# Altium footprint library USB_Hub.PcbLib: 9 footprints
Each footprint in its own frame and in the unit in brackets; x right, y up, seen from the top. Pads: shape width x height; smd on the part's side, far side on the other; paste and mask are expansions set on the pad; w line width, h text height; cw(c..) or ccw(c..) is an arc to the next point about the centre after c.
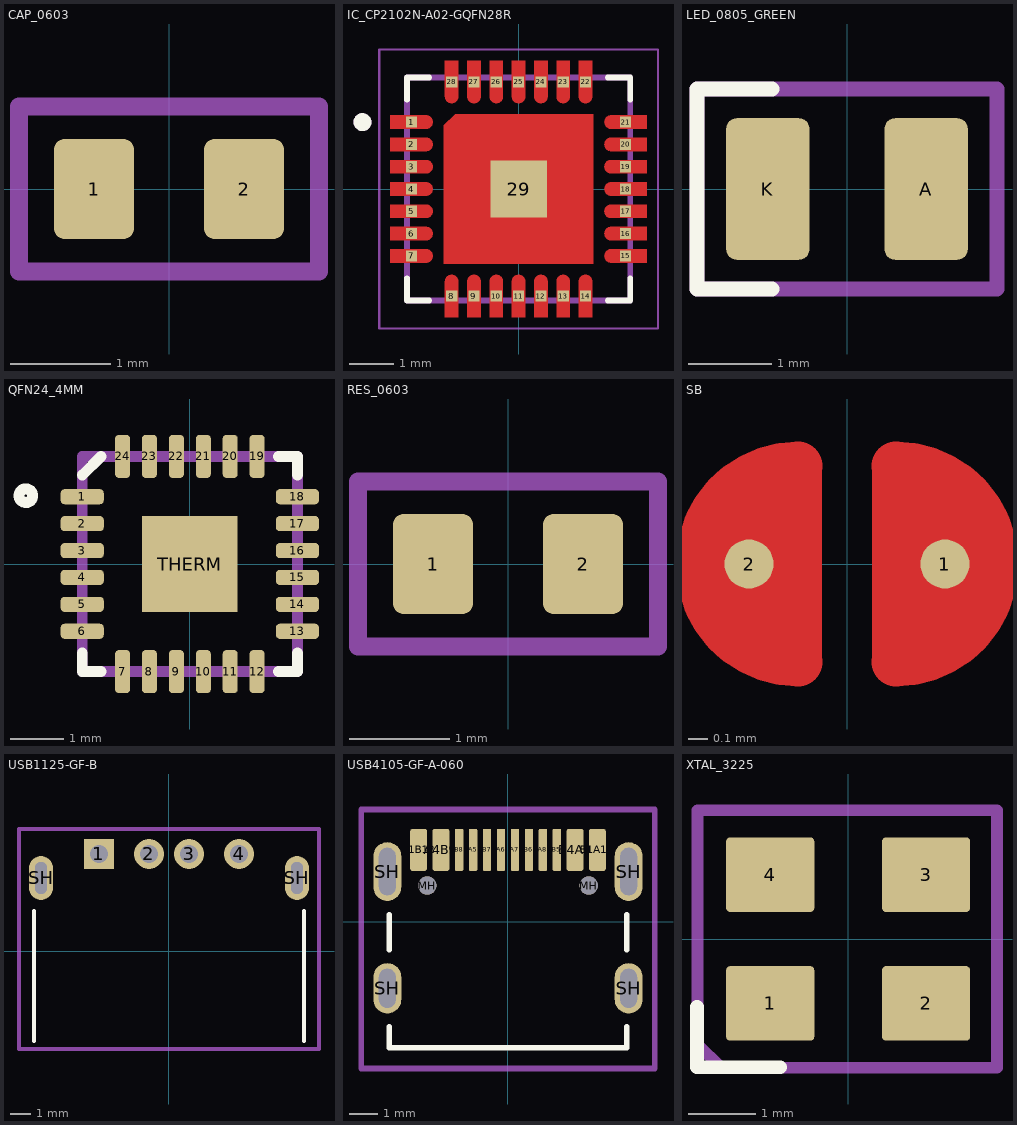
[diagram p0: the footprints below, top view; thin cyan lines are the x and y axes]

## CAP_0603 [mm]
pads (2):
  rrect25% 0.8x1 smd: 1(-0.75,0) 2(0.75,0)
Mechanical 13:
  lines w0.175: -1.5,-0.825 -1.5,0.825 1.5,0.825 1.5,-0.825 -1.5,-0.825
  text "'.Designator'" at -5.665,-0.417 h1
3D body "C0603C104K5RACTU.STEP": height 0.8, standoff 0, extent -0.8,-0.475 0.8,0.475

## IC_CP2102N-A02-GQFN28R [mm]
height 0.8
pads (29):
  rect 0.25x0.25 smd paste-1 mask+0: 1(-2.4,1.5) 2(-2.4,1) 3(-2.4,0.5) 4(-2.4,0) 5(-2.4,-0.5) 6(-2.4,-1) 7(-2.4,-1.5) 8(-1.5,-2.4) 9(-1,-2.4) 10(-0.5,-2.4) 11(0,-2.4) 12(0.5,-2.4) 13(1,-2.4) 14(1.5,-2.4) 15(2.4,-1.5) 16(2.4,-1) 17(2.4,-0.5) 18(2.4,0) 19(2.4,0.5) 20(2.4,1) 21(2.4,1.5) 22(1.5,2.4) 23(1,2.4) 24(0.5,2.4) 25(0,2.4) 26(-0.5,2.4) 27(-1,2.4) 28(-1.5,2.4)
  rect 1.27x1.27 smd paste+0.424 mask+0: 29(0,0)
Top Layer:
  drawing of 29 lines, arcs and shapes, not listed
Top Overlay:
  circle w0.2: c-3.5,1.5 r0.1
  lines w0.127: -2.5,-2 -2.5,-2.5 -2,-2.5 ; -2.5,2 -2.5,2.5 -2,2.5 ; 2,-2.5 2.5,-2.5 2.5,-2 ; 2,2.5 2.5,2.5 2.5,2
Top Paste:
  drawing of 28 lines, arcs and shapes, not listed
Top Solder:
  drawing of 29 lines, arcs and shapes, not listed
Mechanical 13:
  circle w0.2: c-3.5,1.5 r0.1
  lines w0.127: -2.5,-2.5 2.5,-2.5 2.5,2.5 -2.5,2.5 -2.5,-2.5
Mechanical 15:
  lines w0.05: -3.125,-3.125 3.125,-3.125 3.125,3.125 -3.125,3.125 -3.125,-3.125
3D body "step_temp.STEP": height 0.8, standoff 0, extent -2.5,-2.5 2.5,2.5

## LED_0805_GREEN [mm]
pads (2):
  rrect25% 1x1.7 smd: A(0.95,0) K(-0.95,0)
Top Overlay:
  lines w0.175: -0.9,-1.2 -1.8,-1.2 -1.8,1.2 -0.9,1.2
Mechanical 13:
  lines w0.175: -1.8,-1.2 -1.8,1.2 1.8,1.2 1.8,-1.2 -1.8,-1.2
  text "+" at 1.767,1 h1
  text "'.Designator'" at -5.665,-0.417 h1
3D body "LED_0805_GREEN.step": height 1.12, standoff 0.01, extent -1,-0.625 1,0.625

## QFN24_4MM [mm]
pads (25):
  rrect50% 0.8x0.28 smd paste+0 mask+0.102: 1(-2,1.25) 2(-2,0.75) 3(-2,0.25) 4(-2,-0.25) 5(-2,-0.75) 6(-2,-1.25) 13(2,-1.25) 14(2,-0.75) 15(2,-0.25) 16(2,0.25) 17(2,0.75) 18(2,1.25)
  rrect50% 0.28x0.8 smd paste+0 mask+0.102: 7(-1.25,-2) 8(-0.75,-2) 9(-0.25,-2) 10(0.25,-2) 11(0.75,-2) 12(1.25,-2) 19(1.25,2) 20(0.75,2) 21(0.25,2) 22(-0.25,2) 23(-0.75,2) 24(-1.25,2)
  rect 1.778x1.778 smd paste-2 mask+0.102: THERM(0,0)
Top Overlay:
  circle w0.203: c-3.048,1.27 r0.127
  lines w0.203: -2,-1.65 -2,-2 -1.65,-2 ; -2,1.65 -1.65,2 ; 1.65,-2 2,-2 2,-1.65 ; 1.65,2 2,2 2,1.65
Top Paste:
  region: -0.1,-0.75 -0.75,-0.75 -0.75,-0.1 -0.1,-0.1
  region: -0.1,0.1 -0.75,0.1 -0.75,0.75 -0.1,0.75
  region: 0.75,-0.75 0.1,-0.75 0.1,-0.1 0.75,-0.1
  region: 0.75,0.1 0.1,0.1 0.1,0.75 0.75,0.75
Mechanical 13:
  lines w0.203: -2,-2 2,-2 2,2 -2,2 -2,-2
3D body "9FGV0241AKLFT.STEP": height 0.95, standoff -0.05, extent -2,-2 2,2

## RES_0603 [mm]
pads (2):
  rrect25% 0.8x1 smd: 1(-0.75,0) 2(0.75,0)
Mechanical 13:
  lines w0.175: -1.5,-0.825 1.5,-0.825 1.5,0.825 -1.5,0.825 -1.5,-0.825
  text "'.Designator'" at -5.665,-0.417 h1
3D body "step_temp.STEP": height 0.55, standoff 0, extent -0.8,-0.4 0.8,0.4

## SB [mil]
pads (2):
  round 10 smd: 1(20,0) 2(-20,0)
Top Layer:
  region: 10,-20 13.98,-20 21.33,-16.96 26.96,-11.33 30,-3.98 30,3.98 26.96,11.33 21.33,16.96 13.98,20 10,20
  region: -10,-20 -13.98,-20 -21.33,-16.96 -26.96,-11.33 -30,-3.98 -30,3.98 -26.96,11.33 -21.33,16.96 -13.98,20 -10,20
  lines w9.84: -10,-20 -10,20 ; 10,-20 10,20
  lines w10: -10,-20 cw(c-10,0) -10,20 ; 10,-20 ccw(c10,0) 10,20
Top Solder:
  region: -10,-20.62 -14.1,-20.62 -21.68,-17.48 -27.48,-11.68 -30.62,-4.1 -30.62,4.1 -27.48,11.68 -21.68,17.48 -14.1,20.62 -10,20.62 10,20.62 14.1,20.62 21.68,17.48 27.48,11.68 30.62,4.1 30.62,-4.1 27.48,-11.68 21.68,-17.48 14.1,-20.62 10,-20.62
  lines w9.84: -10,-20.62 10,-20.62 ; -10,20.62 10,20.62
  lines w10: -10,-20.62 cw(c-10,0) -10,20.62 ; 10,-20.62 ccw(c10,0) 10,20.62

## USB1125-GF-B [mm]
pads (6):
  rect 1.5x1.5 hole 0.92 mask+0.07: 1(-3.5,4.85)
  round 1.5 hole 0.92 mask+0.07: 2(-1,4.85) 3(1,4.85) 4(3.5,4.85)
  oval 1.2x2.2 hole 0.6 slot 1.6 at 90 deg mask+0.07: SH(-6.4,3.65) SH(6.4,3.65)
Top Overlay:
  lines w0.2: -6.75,-4.5 -6.75,2 ; 6.75,-4.5 6.75,2
Mechanical 13:
  lines w0.2: -7.5,-4.9 -7.5,6.1 7.5,6.1 7.5,-4.9 6.75,-4.9 -6.75,-4.9 -7.5,-4.9
  text "PCB EDGE" at -2.634,-4.725 h0.6
  text "'.Designator'" at -5.84,-0.575 h1
3D body "USB1125-GF-B.stp": height 6.49, standoff -2.52, extent -6.55,-4.9 6.55,5.1

## USB4105-GF-A-060 [mm]
pads (18):
  rrect25% 0.6x1.5 smd mask+0.05: A1B12(-3.2,2.578) A4B9(-2.4,2.578) B1A12(3.2,2.578) B4A9(2.4,2.578)
  rrect25% 0.3x1.5 smd mask+0.05: A5(-1.25,2.578) A6(-0.25,2.578) A7(0.25,2.578) A8(1.25,2.578) B5(1.75,2.578) B6(0.75,2.578) B7(-0.75,2.578) B8(-1.75,2.578)
  round 0.65 hole 0.65 unplated mask+0.05: MH(-2.89,1.303) MH(2.89,1.303)
  oval 1x1.8 hole 0.6 slot 1.4 at 90 deg: SH(-4.32,-2.377) SH(4.32,-2.377)
  oval 1x2.1 hole 0.6 slot 1.7 at 90 deg: SH(-4.32,1.803) SH(4.32,1.803)
Top Overlay:
  lines w0.2: -4.25,-3.75 -4.25,-4.5 4.25,-4.5 4.25,-3.75 ; -4.25,-1 -4.25,0.25 ; 4.25,-1 4.25,0.25
Mechanical 13:
  lines w0.2: -5.25,-5.25 5.25,-5.25 5.25,4.025 -5.25,4.025 -5.25,-3 -5.25,-5.25
  text "'.Designator'" at -5.84,-0.925 h1
3D body "USB4105-GF-A-060.stp": height 3.27, standoff -0.61, extent -4.47,-4.972 4.47,2.728

## XTAL_3225 [mm]
pads (4):
  rrect10% 1.3x1.1 smd: 1(-1.15,-0.95) 2(1.15,-0.95) 3(1.15,0.95) 4(-1.15,0.95)
Top Overlay:
  lines w0.2: -2.231,-1 -2.231,-1.893 -1,-1.893
Mechanical 13:
  circle w0.254: c-1.15,-0.95 r0.112
  lines w0.175: -0.478,1.903 2.197,1.903 2.197,-1.9 -1.875,-1.9 -2.225,-1.55 -2.225,1.903 0.472,1.903
  text "'.Designator'" at -5.665,-0.417 h1
3D body "Y3225.step": height 0.61, standoff 0, extent -1.6,-1.275 1.6,1.225